# Altium footprint library WS-RSTV.PcbLib: 70 footprints (part 3 of 5)
Each footprint in its own frame and in the unit in brackets; x right, y up, seen from the top. Pads: shape width x height; smd on the part's side, far side on the other; paste and mask are expansions set on the pad; w line width, h text height; cw(c..) or ccw(c..) is an arc to the next point about the centre after c.
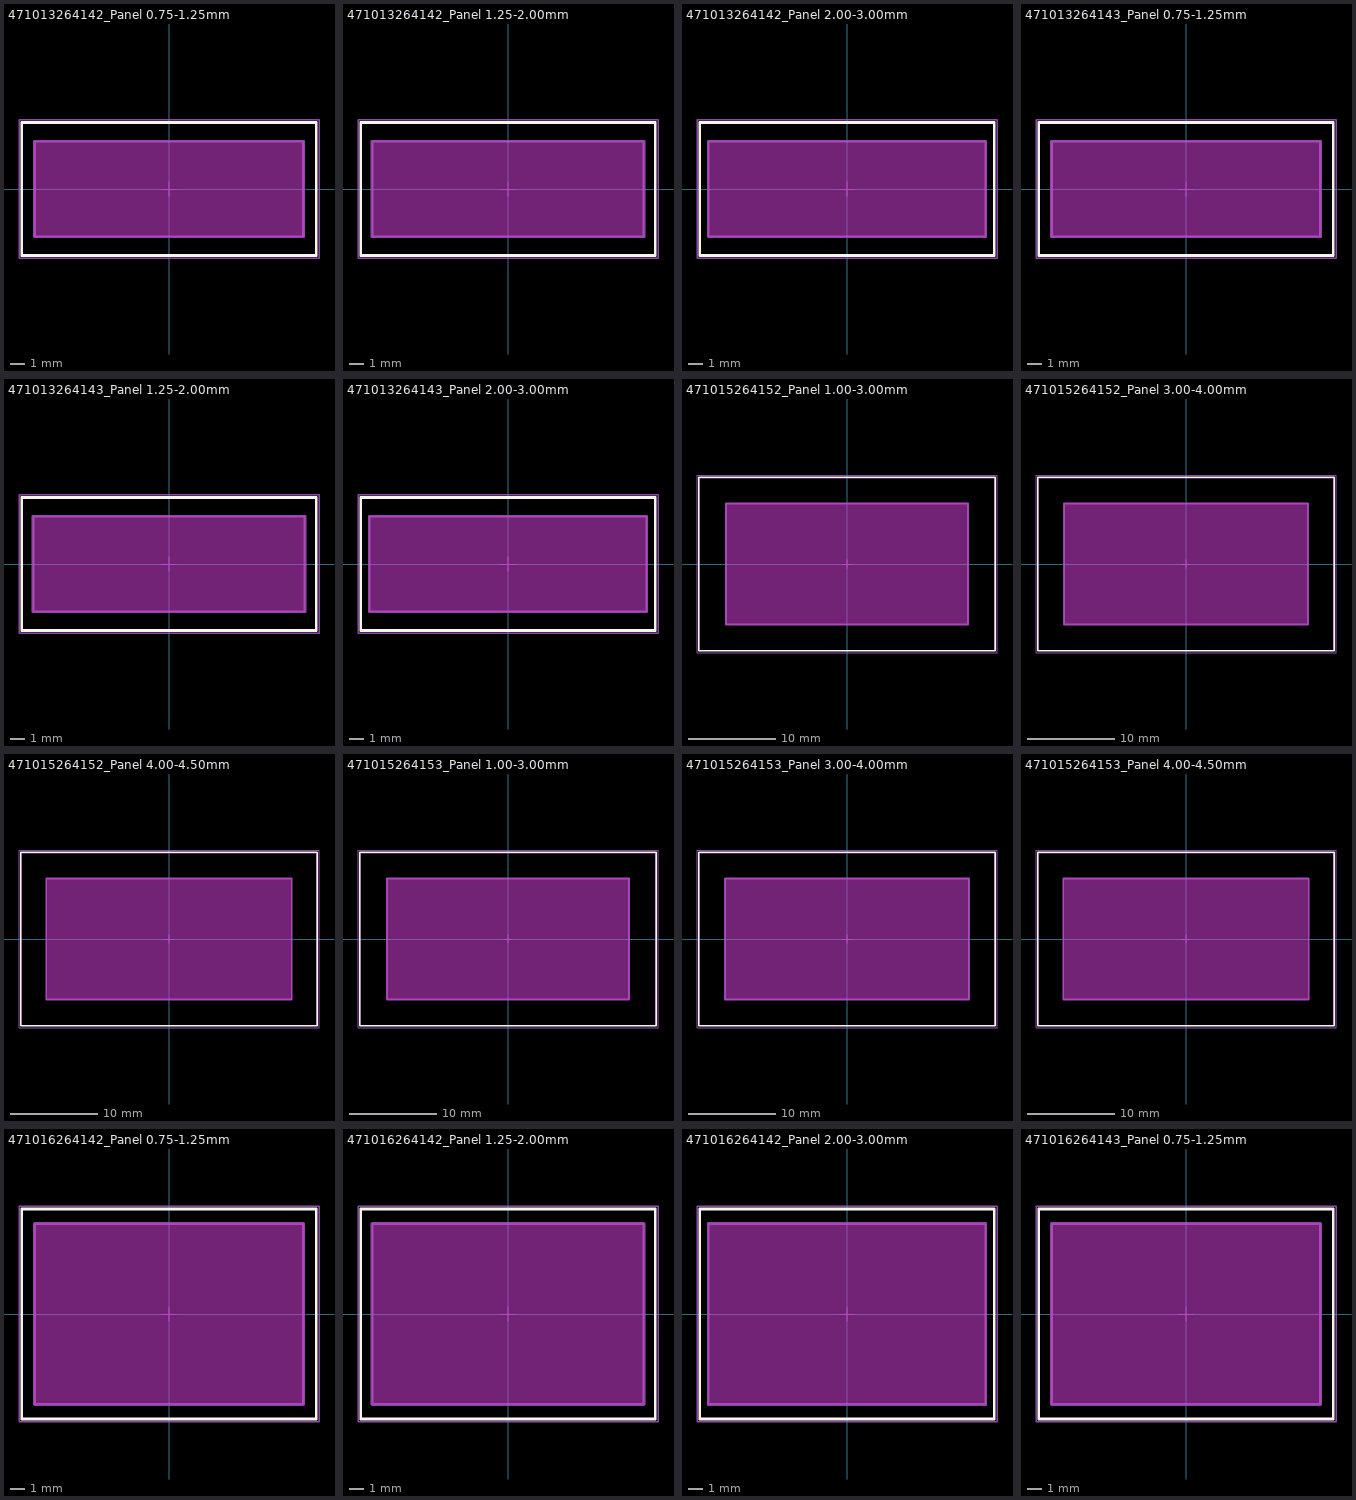
[diagram p2: the footprints below, top view; thin cyan lines are the x and y axes]

## 471013264142_Panel 0.75-1.25mm [mm] "19.2 x 6.8 mm Panel Cutout with 0.187 Quick Connect Terminal Rocker Switch"
height 22.5
Top Overlay:
  lines w0.2: -10.5,-4.75 10.5,-4.75 10.5,4.75 -10.5,4.75 -10.5,-4.75
Keep-Out Layer:
  board cut-out: -9.6,-3.4 -9.6,3.4 9.6,3.4 9.6,-3.4
Board Shape:
  lines w0.2: -9.6,-3.4 -9.6,3.4 9.6,3.4 9.6,-3.4 -9.6,-3.4
Assembly Notes:
  text "Apply for Panel Thickness 0.75-1.25mm" at -11.323,-6.028 h0.81
Top Component Outline:
  lines w0.1: -10.5,-4.75 10.5,-4.75 10.5,4.75 -10.5,4.75 -10.5,-4.75
Top Courtyard:
  lines w0.1: -10.7,-4.95 -10.7,4.95 10.7,4.95 10.7,-4.95 -10.7,-4.95
Top Component Center:
  lines w0.05: -0.5,0 0.5,0 ; 0,-0.5 0,0.5
Top Designator (Mech19):
  text ".Designator" at -7.498,-0.5 h1.5
3D body "471013264142.stp": height 5.86, standoff -21.65, extent -10.598,-4.75 10.598,4.75

## 471013264142_Panel 1.25-2.00mm [mm] "19.2 x 6.8 mm Panel Cutout with 0.187 Quick Connect Terminal Rocker Switch"
height 22.5
Top Overlay:
  lines w0.2: -10.5,-4.75 10.5,-4.75 10.5,4.75 -10.5,4.75 -10.5,-4.75
Keep-Out Layer:
  board cut-out: -9.7,-3.4 -9.7,3.4 9.7,3.4 9.7,-3.4
Board Shape:
  lines w0.2: -9.7,-3.4 -9.7,3.4 9.7,3.4 9.7,-3.4 -9.7,-3.4
Assembly Notes:
  text "Apply for Panel Thickness 1.25-2.00mm" at -11.323,-6.028 h0.81
Top Component Outline:
  lines w0.1: -10.5,-4.75 10.5,-4.75 10.5,4.75 -10.5,4.75 -10.5,-4.75
Top Courtyard:
  lines w0.1: -10.7,-4.95 -10.7,4.95 10.7,4.95 10.7,-4.95 -10.7,-4.95
Top Component Center:
  lines w0.05: -0.5,0 0.5,0 ; 0,-0.5 0,0.5
Top Designator (Mech19):
  text ".Designator" at -7.498,-0.5 h1.5
3D body "471013264142.stp": height 5.86, standoff -21.65, extent -10.598,-4.75 10.598,4.75

## 471013264142_Panel 2.00-3.00mm [mm] "19.2 x 6.8 mm Panel Cutout with 0.187 Quick Connect Terminal Rocker Switch"
height 22.5
Top Overlay:
  lines w0.2: -10.5,-4.75 10.5,-4.75 10.5,4.75 -10.5,4.75 -10.5,-4.75
Keep-Out Layer:
  board cut-out: -9.9,-3.4 -9.9,3.4 9.9,3.4 9.9,-3.4
Board Shape:
  lines w0.2: -9.9,-3.4 -9.9,3.4 9.9,3.4 9.9,-3.4 -9.9,-3.4
Assembly Notes:
  text "Apply for Panel Thickness 2.00-3.00mm" at -11.386,-6.028 h0.81
Top Component Outline:
  lines w0.1: -10.5,-4.75 10.5,-4.75 10.5,4.75 -10.5,4.75 -10.5,-4.75
Top Courtyard:
  lines w0.1: -10.7,-4.95 -10.7,4.95 10.7,4.95 10.7,-4.95 -10.7,-4.95
Top Component Center:
  lines w0.05: -0.5,0 0.5,0 ; 0,-0.5 0,0.5
Top Designator (Mech19):
  text ".Designator" at -7.498,-0.5 h1.5
3D body "471013264142.stp": height 5.86, standoff -21.65, extent -10.598,-4.75 10.598,4.75

## 471013264143_Panel 0.75-1.25mm [mm] "19.2 x 6.8 mm Panel Cutout with 0.187 Quick Connect Terminal Rocker Switch"
height 22.5
Top Overlay:
  lines w0.2: -10.5,-4.75 10.5,-4.75 10.5,4.75 -10.5,4.75 -10.5,-4.75
Keep-Out Layer:
  board cut-out: -9.6,-3.4 -9.6,3.4 9.6,3.4 9.6,-3.4
Board Shape:
  lines w0.2: -9.6,-3.4 -9.6,3.4 9.6,3.4 9.6,-3.4 -9.6,-3.4
Assembly Notes:
  text "Apply for Panel Thickness 0.75-1.25mm" at -11.323,-6.028 h0.81
Top Component Outline:
  lines w0.1: -10.5,-4.75 10.5,-4.75 10.5,4.75 -10.5,4.75 -10.5,-4.75
Top Courtyard:
  lines w0.1: -10.7,-4.95 -10.7,4.95 10.7,4.95 10.7,-4.95 -10.7,-4.95
Top Component Center:
  lines w0.05: -0.5,0 0.5,0 ; 0,-0.5 0,0.5
Top Designator (Mech19):
  text ".Designator" at -7.498,-0.5 h1.5
3D body "471013264143.stp": height 5.86, standoff -21.65, extent -10.598,-4.75 10.598,4.75

## 471013264143_Panel 1.25-2.00mm [mm] "19.2 x 6.8 mm Panel Cutout with 0.187 Quick Connect Terminal Rocker Switch"
height 22.5
Top Overlay:
  lines w0.2: -10.5,-4.75 -10.5,4.75 10.5,4.75 10.5,-4.75 -10.5,-4.75
Keep-Out Layer:
  board cut-out: -9.7,-3.4 -9.7,3.4 9.7,3.4 9.7,-3.4
Board Shape:
  lines w0.2: -9.7,-3.4 9.7,-3.4 9.7,3.4 -9.7,3.4 -9.7,-3.4
Assembly Notes:
  text "Apply for Panel Thickness 1.25-2.00mm" at -11.323,-6.028 h0.81
Top Component Outline:
  lines w0.1: -10.5,-4.75 -10.5,4.75 10.5,4.75 10.5,-4.75 -10.5,-4.75
Top Courtyard:
  lines w0.1: -10.7,-4.95 10.7,-4.95 10.7,4.95 -10.7,4.95 -10.7,-4.95
Top Component Center:
  lines w0.05: -0.5,0 0.5,0 ; 0,-0.5 0,0.5
Top Designator (Mech19):
  text ".Designator" at -7.498,-0.5 h1.5
3D body "471013264143.stp": height 5.86, standoff -21.65, extent -10.598,-4.75 10.598,4.75

## 471013264143_Panel 2.00-3.00mm [mm] "19.2 x 6.8 mm Panel Cutout with 0.187 Quick Connect Terminal Rocker Switch"
height 22.5
Top Overlay:
  lines w0.2: -10.5,-4.75 10.5,-4.75 10.5,4.75 -10.5,4.75 -10.5,-4.75
Keep-Out Layer:
  board cut-out: -9.9,-3.4 -9.9,3.4 9.9,3.4 9.9,-3.4
Board Shape:
  lines w0.2: -9.9,-3.4 -9.9,3.4 9.9,3.4 9.9,-3.4 -9.9,-3.4
Assembly Notes:
  text "Apply for Panel Thickness 2.00-3.00mm" at -11.386,-6.028 h0.81
Top Component Outline:
  lines w0.1: -10.5,-4.75 10.5,-4.75 10.5,4.75 -10.5,4.75 -10.5,-4.75
Top Courtyard:
  lines w0.1: -10.7,-4.95 -10.7,4.95 10.7,4.95 10.7,-4.95 -10.7,-4.95
Top Component Center:
  lines w0.05: -0.5,0 0.5,0 ; 0,-0.5 0,0.5
Top Designator (Mech19):
  text ".Designator" at -7.498,-0.5 h1.5
3D body "471013264143.stp": height 5.86, standoff -21.65, extent -10.598,-4.75 10.598,4.75

## 471015264152_Panel 1.00-3.00mm [mm]
Top Overlay:
  lines w0.2: -16.9,-9.9 16.9,-9.9 16.9,9.9 -16.9,9.9 -16.9,-9.9
Keep-Out Layer:
  board cut-out: -13.8,6.9 13.8,6.9 13.8,-6.9 -13.8,-6.9
Board Shape:
  lines w0.2: -13.8,-6.9 -13.8,6.9 13.8,6.9 13.8,-6.9 -13.8,-6.9
Assembly Notes:
  text "Apply for Panel Thickness 1-3mm" at -10.52,-11.128 h0.81
Top Component Outline:
  lines w0.1: -16.85,-9.85 16.85,-9.85 16.85,9.85 -16.85,9.85 -16.85,-9.85
Top Courtyard:
  lines w0.05: -17.1,-10.1 17.1,-10.1 17.1,10.1 -17.1,10.1 -17.1,-10.1
Top Component Center:
  lines w0.05: -0.5,0 0.5,0 ; 0,-0.5 0,0.5
Top Designator (Mech19):
  text ".Designator" at -7.498,-0.5 h1.5
3D body "471015264152.stp": height 12.8, standoff -27.3, extent -16.85,-9.85 16.85,9.85

## 471015264152_Panel 3.00-4.00mm [mm]
Top Overlay:
  lines w0.2: -16.9,-9.9 -16.9,9.9 16.9,9.9 16.9,-9.9 -16.9,-9.9
Keep-Out Layer:
  board cut-out: -13.9,6.9 13.9,6.9 13.9,-6.9 -13.9,-6.9
Board Shape:
  lines w0.2: -13.9,-6.9 13.9,-6.9 13.9,6.9 -13.9,6.9 -13.9,-6.9
Assembly Notes:
  text "Apply for Panel Thickness 3-4mm" at -10.584,-11.128 h0.81
Top Component Outline:
  lines w0.1: -16.85,-9.85 -16.85,9.85 16.85,9.85 16.85,-9.85 -16.85,-9.85
Top Courtyard:
  lines w0.05: -17.1,-10.1 -17.1,10.1 17.1,10.1 17.1,-10.1 -17.1,-10.1
Top Component Center:
  lines w0.05: -0.5,0 0.5,0 ; 0,-0.5 0,0.5
Top Designator (Mech19):
  text ".Designator" at -7.498,-0.5 h1.5
3D body "471015264152.stp": height 12.8, standoff -27.3, extent -16.85,-9.85 16.85,9.85

## 471015264152_Panel 4.00-4.50mm [mm]
Top Overlay:
  lines w0.2: -16.9,-9.9 -16.9,9.9 16.9,9.9 16.9,-9.9 -16.9,-9.9
Keep-Out Layer:
  board cut-out: -14,6.9 14,6.9 14,-6.9 -14,-6.9
Board Shape:
  lines w0.2: -14,-6.9 14,-6.9 14,6.9 -14,6.9 -14,-6.9
Assembly Notes:
  text "Apply for Panel Thickness 4-4.5mm" at -11.073,-11.128 h0.81
Top Component Outline:
  lines w0.1: -16.85,-9.85 -16.85,9.85 16.85,9.85 16.85,-9.85 -16.85,-9.85
Top Courtyard:
  lines w0.05: -17.1,-10.1 -17.1,10.1 17.1,10.1 17.1,-10.1 -17.1,-10.1
Top Component Center:
  lines w0.05: -0.5,0 0.5,0 ; 0,-0.5 0,0.5
Top Designator (Mech19):
  text ".Designator" at -7.498,-0.5 h1.5
3D body "471015264152.stp": height 12.8, standoff -27.3, extent -16.85,-9.85 16.85,9.85

## 471015264153_Panel 1.00-3.00mm [mm]
Top Overlay:
  lines w0.2: -16.9,-9.9 -16.9,9.9 16.9,9.9 16.9,-9.9 -16.9,-9.9
Keep-Out Layer:
  board cut-out: -13.8,6.9 13.8,6.9 13.8,-6.9 -13.8,-6.9
Board Shape:
  lines w0.2: -13.8,-6.9 13.8,-6.9 13.8,6.9 -13.8,6.9 -13.8,-6.9
Assembly Notes:
  text "Apply for Panel Thickness 1-3mm" at -10.52,-11.128 h0.81
Top Component Outline:
  lines w0.1: -16.85,-9.85 -16.85,9.85 16.85,9.85 16.85,-9.85 -16.85,-9.85
Top Courtyard:
  lines w0.05: -17.1,-10.1 -17.1,10.1 17.1,10.1 17.1,-10.1 -17.1,-10.1
Top Component Center:
  lines w0.05: -0.5,0 0.5,0 ; 0,-0.5 0,0.5
Top Designator (Mech19):
  text ".Designator" at -7.498,-0.5 h1.5
3D body "471015264153.stp": height 12.8, standoff -27.3, extent -16.85,-9.85 16.85,9.85

## 471015264153_Panel 3.00-4.00mm [mm]
Top Overlay:
  lines w0.2: -16.9,-9.9 -16.9,9.9 16.9,9.9 16.9,-9.9 -16.9,-9.9
Keep-Out Layer:
  board cut-out: -13.9,6.9 13.9,6.9 13.9,-6.9 -13.9,-6.9
Board Shape:
  lines w0.2: -13.9,-6.9 13.9,-6.9 13.9,6.9 -13.9,6.9 -13.9,-6.9
Assembly Notes:
  text "Apply for Panel Thickness 3-4mm" at -10.584,-11.128 h0.81
Top Component Outline:
  lines w0.1: -16.85,-9.85 -16.85,9.85 16.85,9.85 16.85,-9.85 -16.85,-9.85
Top Courtyard:
  lines w0.05: -17.1,-10.1 -17.1,10.1 17.1,10.1 17.1,-10.1 -17.1,-10.1
Top Component Center:
  lines w0.05: -0.5,0 0.5,0 ; 0,-0.5 0,0.5
Top Designator (Mech19):
  text ".Designator" at -7.498,-0.5 h1.5
3D body "471015264153.stp": height 12.8, standoff -27.3, extent -16.85,-9.85 16.85,9.85

## 471015264153_Panel 4.00-4.50mm [mm]
Top Overlay:
  lines w0.2: -16.9,-9.9 16.9,-9.9 16.9,9.9 -16.9,9.9 -16.9,-9.9
Keep-Out Layer:
  board cut-out: -14,6.9 14,6.9 14,-6.9 -14,-6.9
Board Shape:
  lines w0.2: -14,-6.9 -14,6.9 14,6.9 14,-6.9 -14,-6.9
Assembly Notes:
  text "Apply for Panel Thickness 4-4.5mm" at -11.073,-11.128 h0.81
Top Component Outline:
  lines w0.1: -16.85,-9.85 16.85,-9.85 16.85,9.85 -16.85,9.85 -16.85,-9.85
Top Courtyard:
  lines w0.05: -17.1,-10.1 17.1,-10.1 17.1,10.1 -17.1,10.1 -17.1,-10.1
Top Component Center:
  lines w0.05: -0.5,0 0.5,0 ; 0,-0.5 0,0.5
Top Designator (Mech19):
  text ".Designator" at -7.498,-0.5 h1.5
3D body "471015264153.stp": height 12.8, standoff -27.3, extent -16.85,-9.85 16.85,9.85

## 471016264142_Panel 0.75-1.25mm [mm] "19.2 x 12.9 mm panel Cut-out with 0.187” quick connect terminal Rocker Switch, DPST"
height 22.5
Top Overlay:
  lines w0.2: -10.5,-7.5 10.5,-7.5 10.5,7.5 -10.5,7.5 -10.5,-7.5
Keep-Out Layer:
  board cut-out: -9.6,-6.45 -9.6,6.45 9.6,6.45 9.6,-6.45
Board Shape:
  lines w0.2: -9.6,-6.45 9.6,-6.45 9.6,6.45 -9.6,6.45 -9.6,-6.45
Assembly Notes:
  text "Apply for Panel Thickness 0.75-1.25mm" at -11.323,-8.628 h0.81
Top Component Outline:
  lines w0.1: -10.5,-7.5 10.5,-7.5 10.5,7.5 -10.5,7.5 -10.5,-7.5
Top Courtyard:
  lines w0.1: -10.7,-7.7 -10.7,7.7 10.7,7.7 10.7,-7.7 -10.7,-7.7
Top Component Center:
  lines w0.05: -0.5,0 0.5,0 ; 0,-0.5 0,0.5
Top Designator (Mech19):
  text ".Designator" at -7.498,-0.5 h1.5
3D body "471016264142.stp": height 5.86, standoff -21.65, extent -10.589,-7.5 10.589,7.5

## 471016264142_Panel 1.25-2.00mm [mm] "19.2 x 12.9 mm panel Cut-out with 0.187” quick connect terminal Rocker Switch, DPST"
height 22.5
Top Overlay:
  lines w0.2: -10.5,-7.5 10.5,-7.5 10.5,7.5 -10.5,7.5 -10.5,-7.5
Keep-Out Layer:
  board cut-out: -9.7,-6.45 -9.7,6.45 9.7,6.45 9.7,-6.45
Board Shape:
  lines w0.2: -9.7,-6.45 9.7,-6.45 9.7,6.45 -9.7,6.45 -9.7,-6.45
Assembly Notes:
  text "Apply for Panel Thickness 1.25-2.00mm" at -11.323,-8.628 h0.81
Top Component Outline:
  lines w0.1: -10.5,-7.5 10.5,-7.5 10.5,7.5 -10.5,7.5 -10.5,-7.5
Top Courtyard:
  lines w0.1: -10.7,-7.7 -10.7,7.7 10.7,7.7 10.7,-7.7 -10.7,-7.7
Top Component Center:
  lines w0.05: -0.5,0 0.5,0 ; 0,-0.5 0,0.5
Top Designator (Mech19):
  text ".Designator" at -7.498,-0.5 h1.5
3D body "471016264142.stp": height 5.86, standoff -21.65, extent -10.589,-7.5 10.589,7.5

## 471016264142_Panel 2.00-3.00mm [mm] "19.2 x 12.9 mm panel Cut-out with 0.187” quick connect terminal Rocker Switch, DPST"
height 22.5
Top Overlay:
  lines w0.2: -10.5,-7.5 10.5,-7.5 10.5,7.5 -10.5,7.5 -10.5,-7.5
Keep-Out Layer:
  board cut-out: -9.9,-6.45 -9.9,6.45 9.9,6.45 9.9,-6.45
Board Shape:
  lines w0.2: -9.9,-6.45 9.9,-6.45 9.9,6.45 -9.9,6.45 -9.9,-6.45
Assembly Notes:
  text "Apply for Panel Thickness 0.75-1.25mm" at -11.323,-8.628 h0.81
Top Component Outline:
  lines w0.1: -10.5,-7.5 10.5,-7.5 10.5,7.5 -10.5,7.5 -10.5,-7.5
Top Courtyard:
  lines w0.1: -10.7,-7.7 -10.7,7.7 10.7,7.7 10.7,-7.7 -10.7,-7.7
Top Component Center:
  lines w0.05: -0.5,0 0.5,0 ; 0,-0.5 0,0.5
Top Designator (Mech19):
  text ".Designator" at -7.498,-0.5 h1.5
3D body "471016264142.stp": height 5.86, standoff -21.65, extent -10.589,-7.5 10.589,7.5

## 471016264143_Panel 0.75-1.25mm [mm] "19.2 x 12.9 mm panel Cut-out with  0.187” quick connect terminal  Rocker Switch"
height 22.5
Top Overlay:
  lines w0.2: -10.5,-7.5 -10.5,7.5 10.5,7.5 10.5,-7.5 -10.5,-7.5
Keep-Out Layer:
  board cut-out: -9.6,-6.45 -9.6,6.45 9.6,6.45 9.6,-6.45
Board Shape:
  lines w0.2: -9.6,-6.45 -9.6,6.45 9.6,6.45 9.6,-6.45 -9.6,-6.45
Assembly Notes:
  text "Apply for Panel Thickness 1-3mm" at -9.62,-8.628 h0.81
Top Component Outline:
  lines w0.1: -10.5,-7.5 -10.5,7.5 10.5,7.5 10.5,-7.5 -10.5,-7.5
Top Courtyard:
  lines w0.1: -10.7,-7.7 10.7,-7.7 10.7,7.7 -10.7,7.7 -10.7,-7.7
Top Component Center:
  lines w0.05: -0.5,0 0.5,0 ; 0,-0.5 0,0.5
Top Designator (Mech19):
  text ".Designator" at -7.498,-0.5 h1.5
3D body "471016264143.stp": height 5.86, standoff -21.65, extent -10.6,-7.5 10.6,7.5